# Altium footprint library PJ-320A.PcbLib: 1 footprints
Each footprint in its own frame and in the unit in brackets; x right, y up, seen from the top. Pads: shape width x height; smd on the part's side, far side on the other; paste and mask are expansions set on the pad; w line width, h text height; cw(c..) or ccw(c..) is an arc to the next point about the centre after c.
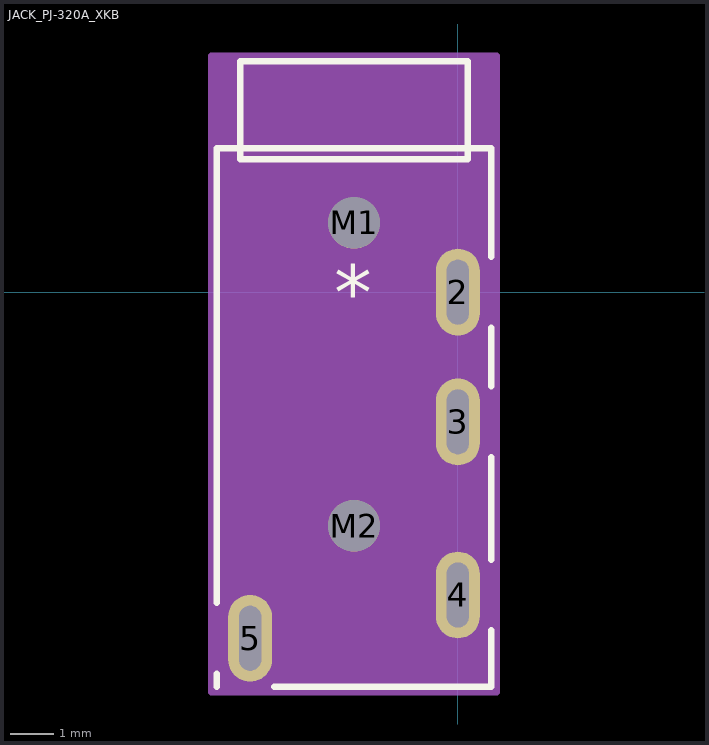
[diagram p0: the footprint, top view; thin cyan lines are the x and y axes]

## JACK_PJ-320A_XKB [mil]
pads (6):
  oval 40x79 hole 59 slot 20 at 0 deg paste+0 mask+0: 2(0,0) 3(0,-118.11) 4(0,-275.59) 5(-188.98,-314.96)
  round 47 hole 47 unplated paste+0 mask+0: M1(-94.49,62.99) M2(-94.49,-212.6)
Top Overlay:
  lines w6: -219.49,-359.02 -219.49,-347.29 ; -219.49,-282.63 -219.49,130.98 30.51,130.98 30.51,32.33 ; -166.78,-359.02 30.51,-359.02 30.51,-307.92 ; 30.51,-243.26 30.51,-150.44 ; 30.51,-85.78 30.51,-32.33 ; -197.99,120.98 9.01,120.98 9.01,209.98 -197.99,209.98 -197.99,120.98
  text "*" at -112.5,-25 h50
  text ".Designator" at -231.99,-25 h50
Mechanical 13:
  lines w1: -214.49,-354.02 25.51,-354.02 25.51,125.98 -214.49,125.98 -214.49,-354.02 ; -192.99,125.98 4.01,125.98 4.01,204.98 -192.99,204.98 -192.99,125.98
  text ".Designator" at -231.99,-25 h50
  text "*" at -112.5,-25 h50
Mechanical 15:
  region: 35.51,-364.02 35.51,214.98 -224.49,214.98 -224.49,-364.02
  lines w6: -224.49,-364.02 -224.49,214.98 35.51,214.98 35.51,-364.02 -224.49,-364.02